# Altium footprint library BS_RFE_BB_20230506.PcbLib: 77 footprints (part 1 of 5)
Each footprint in its own frame and in the unit in brackets; x right, y up, seen from the top. Pads: shape width x height; smd on the part's side, far side on the other; paste and mask are expansions set on the pad; w line width, h text height; cw(c..) or ccw(c..) is an arc to the next point about the centre after c.
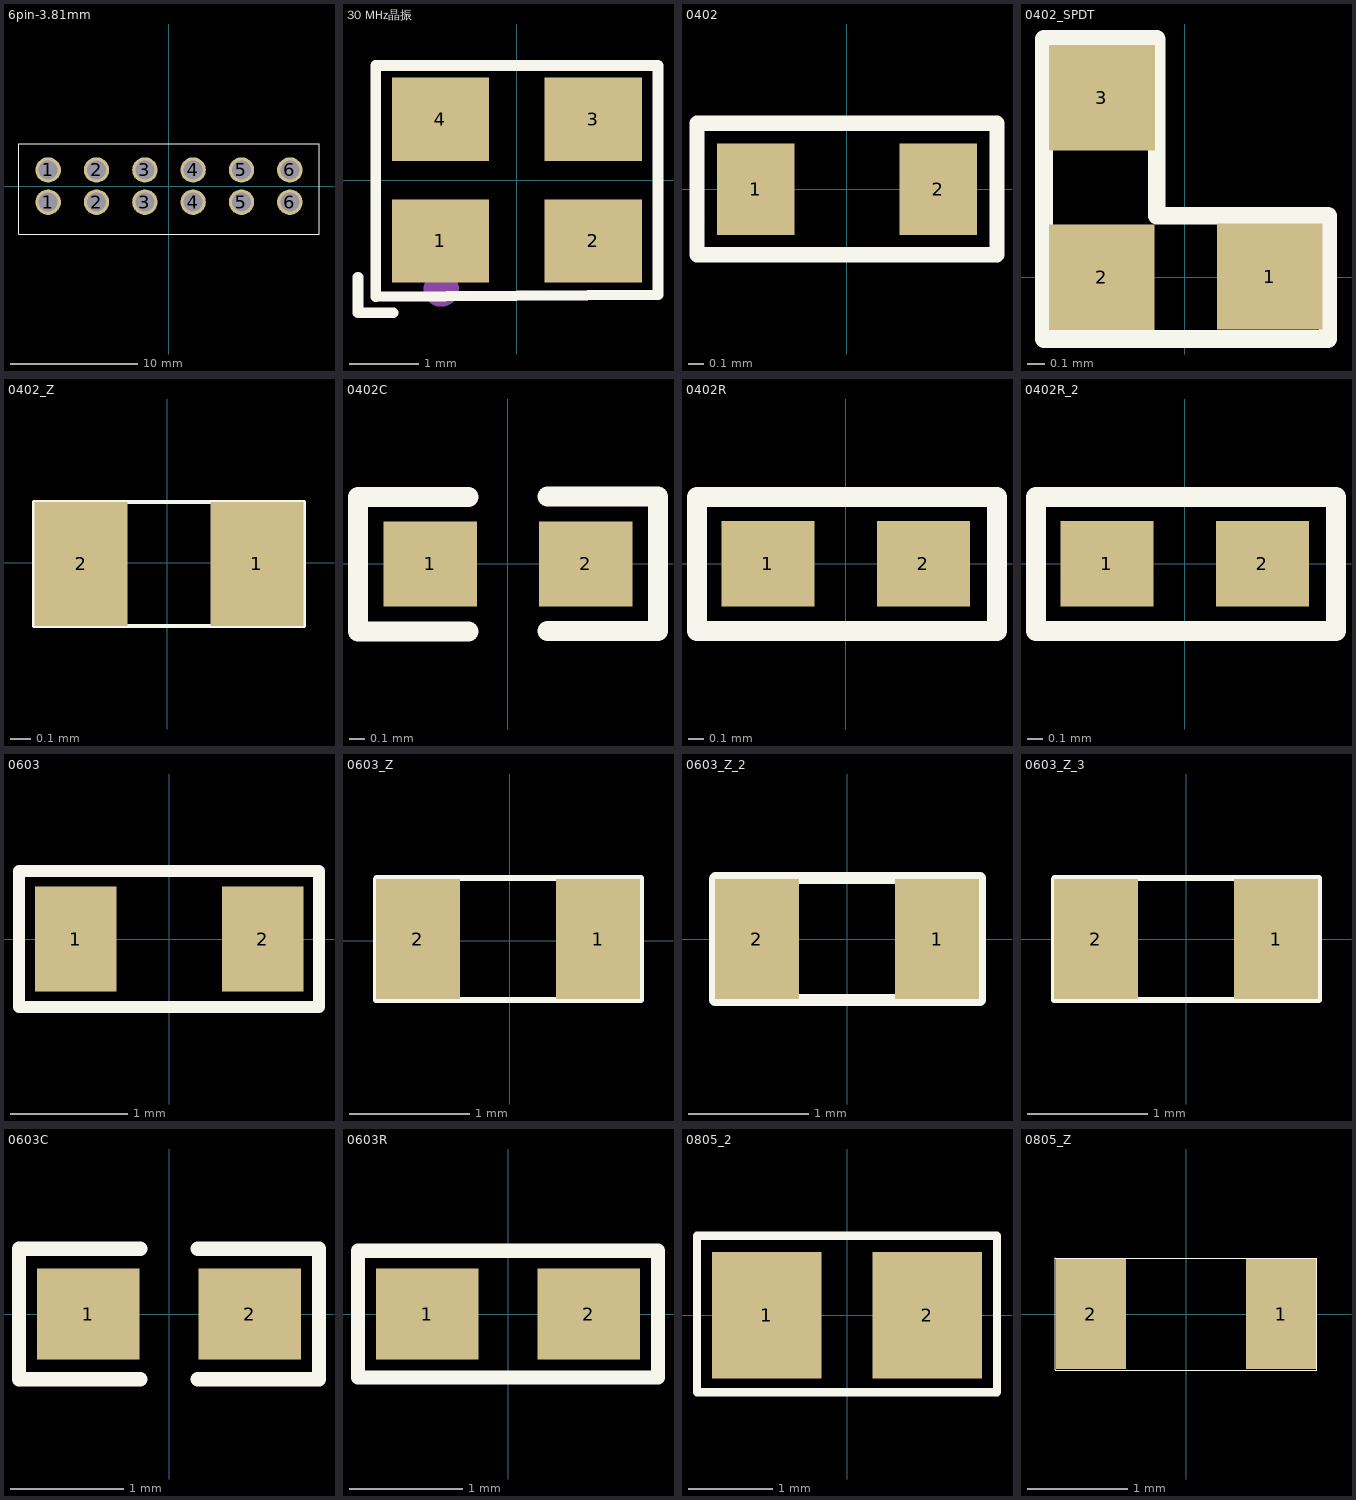
[diagram p0: the footprints below, top view; thin cyan lines are the x and y axes]

## 6pin-3.81mm [mm]
pads (12):
  round 2 hole 1.5 paste-2539.97 mask+0.051: 1(-9.525,-1.27) 1(-9.525,1.27) 2(-5.715,-1.27) 2(-5.715,1.27) 3(-1.905,-1.27) 3(-1.905,1.27) 4(1.905,-1.27) 4(1.905,1.27) 5(5.715,-1.27) 5(5.715,1.27) 6(9.525,-1.27) 6(9.525,1.27)
Top Overlay:
  lines w0.05: -11.825,-3.81 11.825,-3.81 11.825,3.35 -11.825,3.35 -11.825,-3.81

## 30 MHz晶振 [mm]
pads (4):
  rect 1.4x1.2 smd: 1(-1.1,-0.875) 2(1.1,-0.875) 3(1.1,0.875) 4(-1.1,0.875)
Top Overlay:
  lines w0.152: -2.286,-1.397 -2.286,-1.905 -1.778,-1.905 ; -2.029,-1.679 -2.029,1.651 2.032,1.651 2.032,0 2.032,-1.651 -2.029,-1.679
Mechanical 15:
  circle w0.254: c-1.088,-1.567 r0.127
  region: -1.486,-0.428 -1.45,-0.428 -1.45,-1.004 -1.486,-1.004
  region: -1.522,-0.428 -1.486,-0.428 -1.486,-1.004 -1.522,-1.004
  region: -1.558,-0.428 -1.522,-0.428 -1.522,-1.004 -1.558,-1.004
  region: -1.594,-0.464 -1.558,-0.464 -1.558,-1.004 -1.594,-1.004
  region: -1.63,-0.464 -1.594,-0.464 -1.594,-0.572 -1.63,-0.572
  region: -1.666,-0.5 -1.63,-0.5 -1.63,-0.608 -1.666,-0.608
  region: -1.702,-0.536 -1.666,-0.536 -1.666,-0.608 -1.702,-0.608
  region: -1.738,-0.536 -1.702,-0.536 -1.702,-0.608 -1.738,-0.608

## 0402 [mm]
pads (2):
  rect 0.508x0.6 smd: 1(-0.6,0) 2(0.6,0)
Top Overlay:
  lines w0.1: -0.985,-0.431 0.986,-0.431 0.986,0.433 -0.985,0.433 -0.985,-0.431

## 0402_SPDT [mm]
pads (3):
  rect 0.6x0.6 smd mask+0.051: 1(0.481,0.005) 2(-0.472,0) 3(-0.471,1.02)
Top Overlay:
  lines w0.1: -0.8,-0.35 0.813,-0.35 0.813,0.35 -0.16,0.35 -0.16,1.353 -0.8,1.353 -0.8,-0.35
3D body "User Library-RES_1005-0402.STEP": height 0.41, standoff 0, extent -0.74,-0.21 -0.19,0.94
3D body "User Library-RES_1005-0402.STEP": height 0.41, standoff 0, extent -0.575,-0.275 0.575,0.275

## 0402_Z [mm]
pads (2):
  rect 0.45x0.6 smd mask+0: 1(0.434,-0.006) 2(-0.416,-0.006)
Top Overlay:
  lines w0.02: 0.662,-0.306 -0.644,-0.306 -0.644,0.294 0.661,0.294 ; 0.662,-0.305 0.662,0.289
3D body: height 0.25, standoff 0, extent -0.406,-0.313 0.436,0.292

## 0402C [mm]
pads (2):
  rect 0.6x0.55 smd: 1(-0.5,0) 2(0.5,0)
Top Overlay:
  lines w0.127: -0.254,-0.434 -0.965,-0.434 -0.965,0.432 -0.254,0.432 ; 0.254,-0.432 0.965,-0.432 0.965,0.434 0.254,0.434
3D body: height 0.55, standoff 0, extent -0.635,-0.381 0.635,0.381

## 0402R [mm]
pads (2):
  rect 0.6x0.55 smd: 1(-0.5,0) 2(0.5,0)
Top Overlay:
  lines w0.127: -0.957,-0.432 -0.957,0.431 0.973,0.431 0.973,-0.432 -0.957,-0.432
3D body: height 0.55, standoff 0, extent -0.635,-0.381 0.635,0.381

## 0402R_2 [mm]
pads (2):
  rect 0.6x0.55 smd: 1(-0.5,0) 2(0.5,0)
Top Overlay:
  lines w0.127: -0.957,-0.432 -0.957,0.431 0.973,0.431 0.973,-0.432 -0.957,-0.432

## 0603 [mm]
pads (2):
  rect 0.7x0.9 smd: 1(-0.8,0) 2(0.8,0)
Top Overlay:
  lines w0.1: -1.285,-0.581 1.282,-0.581 1.282,0.582 -1.285,0.582 -1.285,-0.581

## 0603_Z [mm]
pads (2):
  rect 0.7x1 smd mask+0: 1(0.735,0.013) 2(-0.765,0.013)
Top Overlay:
  lines w0.05: -1.115,-0.493 -1.115,0.516 ; -1.111,-0.494 1.095,-0.494 1.095,0.522 -1.111,0.522

## 0603_Z_2 [mm]
pads (2):
  rect 0.7x1 smd: 1(0.75,0) 2(-0.75,0)
Top Overlay:
  lines w0.1: -1.1,-0.506 -1.1,0.503 ; -1.096,-0.506 1.11,-0.506 1.11,0.509 -1.096,0.509
3D body "L0603.STEP": height 0.46, standoff -0.01, extent -0.825,-0.413 0.825,0.412

## 0603_Z_3 [mm]
pads (2):
  rect 0.7x1 smd: 1(0.75,0) 2(-0.75,0)
Top Overlay:
  lines w0.05: -1.1,-0.506 -1.1,0.503 ; -1.096,-0.506 1.11,-0.506 1.11,0.509 -1.096,0.509
3D body "L0603.STEP": height 0.46, standoff -0.01, extent -0.825,-0.413 0.825,0.412

## 0603C [mm]
pads (2):
  rect 0.9x0.8 smd: 1(-0.711,0) 2(0.711,0)
Top Overlay:
  lines w0.127: -0.254,-0.573 -1.321,-0.573 -1.321,0.573 -0.254,0.573 ; 0.254,-0.573 1.321,-0.573 1.321,0.573 0.254,0.573

## 0603R [mm]
pads (2):
  rect 0.9x0.8 smd: 1(-0.711,0) 2(0.711,0)
Top Overlay:
  lines w0.127: -1.321,-0.559 -1.321,0.559 1.321,0.559 1.321,-0.559 -1.321,-0.559
3D body: height 0.9, standoff 0, extent -0.85,-0.475 0.85,0.475

## 0805_2 [mm]
pads (2):
  rect 1.3x1.5 smd: 1(-0.95,0) 2(0.95,0)
Top Overlay:
  lines w0.1: -1.778,-0.914 1.778,-0.914 1.778,0.94 -1.778,0.94 -1.778,-0.914

## 0805_Z [mm]
pads (2):
  rect 0.7x1.1 smd: 1(0.95,0) 2(-0.95,0)
Top Overlay:
  lines w0.01: -1.31,0.56 1.31,0.56 ; -1.31,0.561 -1.31,-0.559 -1.309,-0.56 1.31,-0.56 1.31,0.56 ; 1.31,0.56 1.31,0.56
3D body "L0603.STEP": height 0.46, standoff -0.01, extent -0.802,-0.413 0.802,0.412